# Altium schematic symbol library Electrode.SCHLIB: 2 symbols
Pins are listed as number, name and electrical type; pins without a type are passive.

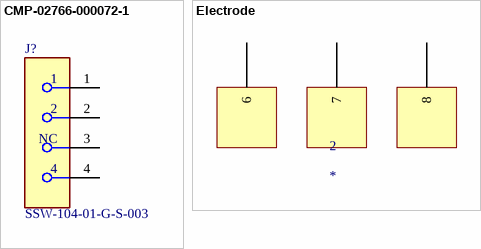
[diagram p0: symbols CMP-02766-000072-1 to Electrode]

## CMP-02766-000072-1
designator J?, comment SSW-104-01-G-S-003
CONN RCPT 4POS 0.1 GOLD PCB; Manufacturer: Samtec; Conn Gender: Female; Is Female: yes; Description: Conn Socket Strip SKT 4 POS 2.54mm Solder ST Thru-Hole; Voltage Rating: 655V; Current Rating: 4.7A; Conn Orientation: Vertical; Number Of Contacts: 4; Pitch: 2.54mm; Height: 8.64mm; Package: 0; Device Class L1: Connectors; Lead Free: Yes; Octopart: https://octopart.com/ssw-104-01-g-s-003-samtec-17456976; Temperature Range High: +125°C; Device Class L3: unset; ComponentLink2URL: http://suddendocs.samtec.com/catalog_english/ssw_th.pdf; Device Class L2: Headers and Wire Housings; Footprint Url: http://suddendocs.samtec.com/prints/ssw-s.pdf; Digikey Description: CONN RCPT 4POS 0.1 GOLD PCB; Number Of Rows: 1; Temperature Range Low: -55°C; Contact Material: Gold,Nickel; Automotive: No; ComponentLink2Description: Datasheet; Temperature: -55°C to +125°C; Category: Conn; Manufacturer Part Number: SSW-104-01-G-S-003; RoHS: TRUE
footprint FP-SSW-104-01-G-S-003-MFG
pins: 1, 2, 3 NC, 4

## Electrode
designator 2
footprint Electrode
pins: 6, 7, 8